# Altium footprint library FootPrintLib_11.PcbLib: 376 footprints (part 21 of 24)
Each footprint in its own frame and in the unit in brackets; x right, y up, seen from the top. Pads: shape width x height; smd on the part's side, far side on the other; paste and mask are expansions set on the pad; w line width, h text height; cw(c..) or ccw(c..) is an arc to the next point about the centre after c.
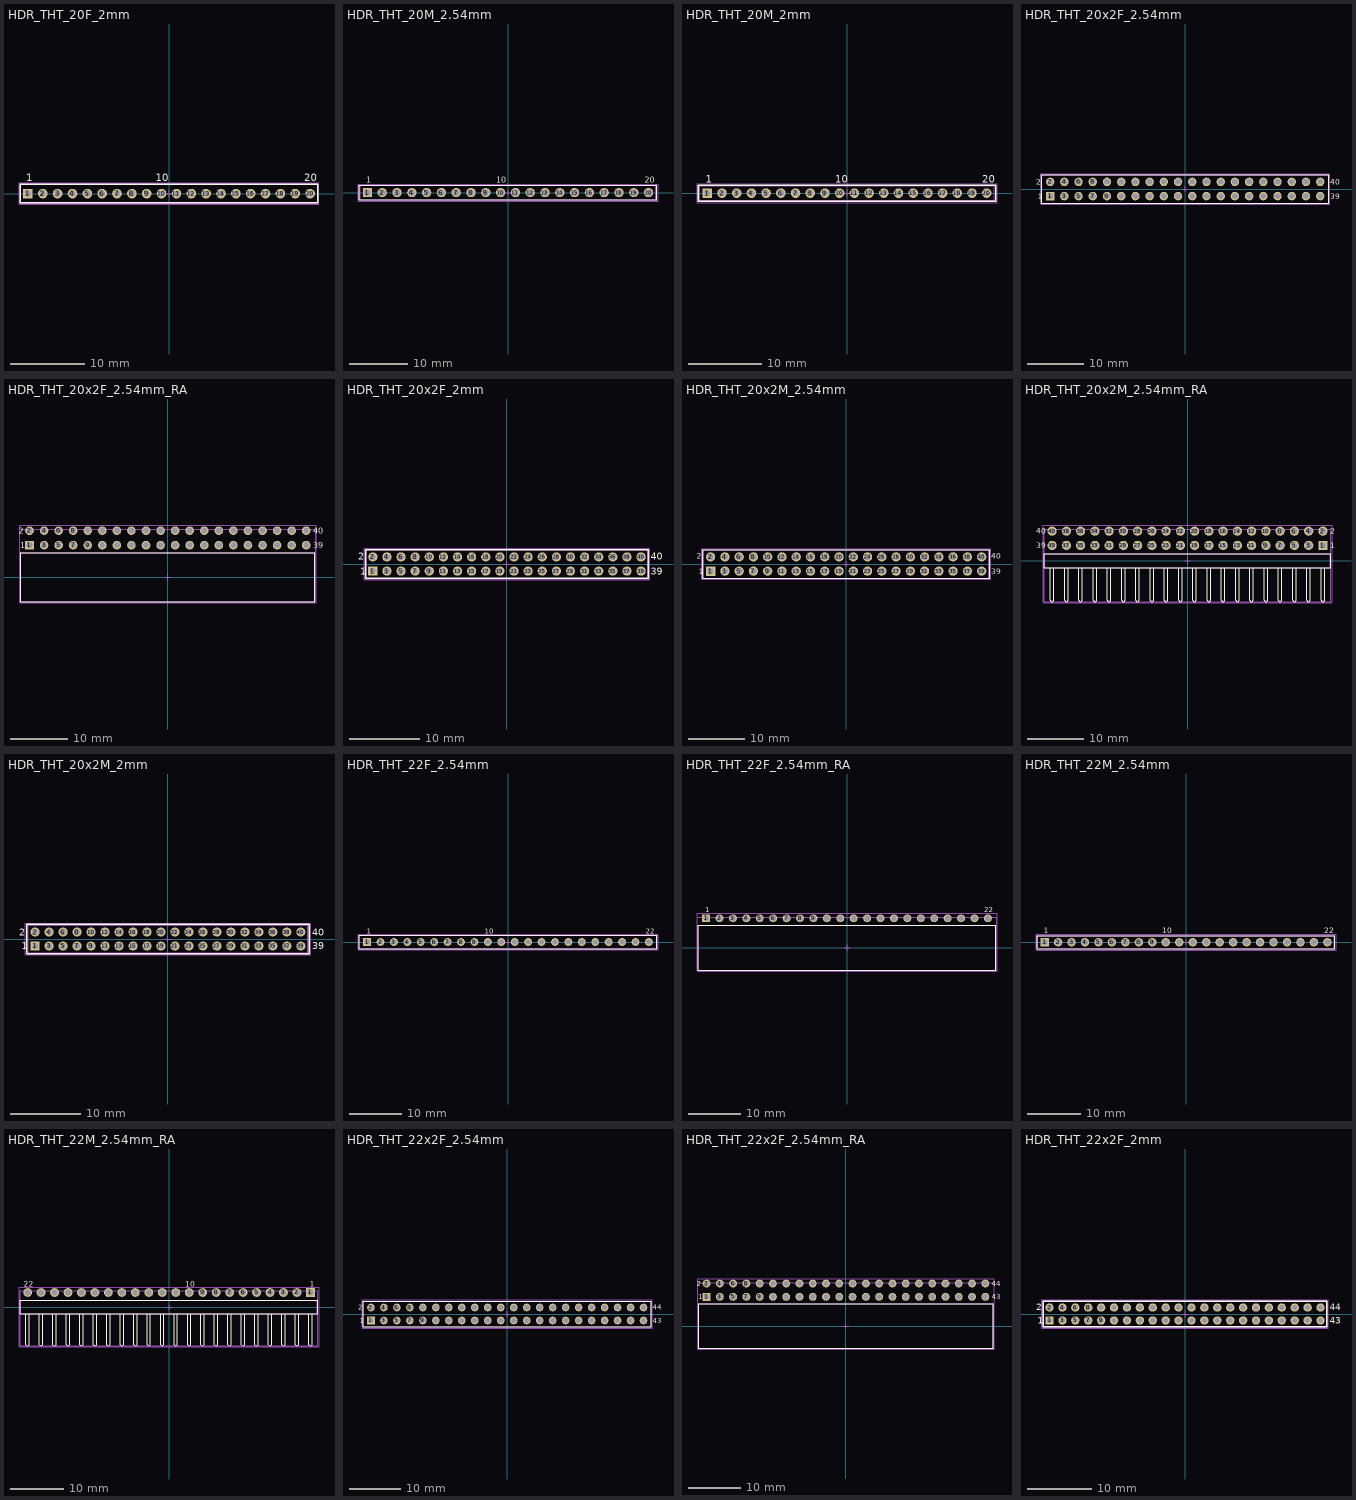
[diagram p20: the footprints below, top view; thin cyan lines are the x and y axes]

## HDR_THT_20F_2mm [mm] "Socket Header, Pitch 2.00 mm, THT, Vertical, single row, 20p"
height 4.45
pads (20):
  rect 1.3x1.3 hole 0.8: 1(-19,0)
  round 1.3 hole 0.8: 2(-17,0) 3(-15,0) 4(-13,0) 5(-11,0) 6(-9,0) 7(-7,0) 8(-5,0) 9(-3,0) 10(-1,0) 11(1,0) 12(3,0) 13(5,0) 14(7,0) 15(9,0) 16(11,0) 17(13,0) 18(15,0) 19(17,0) 20(19,0)
Top Overlay:
  lines w0.2: -20,-1.25 20,-1.25 20,1.25 -20,1.25 -20,-1.25
  text "20" at 18.2,1.7 h1
  text "1" at -19.2,1.7 h1
  text "10" at -1.8,1.7 h1
Mechanical 11:
  lines w0.1: -20,-1.25 20,-1.25 20,1.25 -20,1.25 -20,-1.25
Mechanical 13:
  lines w0.1: -20.15,-1.325 20.15,-1.325 20.15,1.325 -20.15,1.325 -20.15,-1.325
Mechanical 15:
  lines w0.1: -0.5,0 0.5,0 ; 0,-0.5 0,0.5 ; -20.2,-1.45 20.2,-1.45 20.2,1.45 -20.2,1.45 -20.2,-1.45
3D body "62002011821.stp": height 4.35, standoff -2.65, extent -20.25,-1.25 20.25,1.25

## HDR_THT_20M_2.54mm [mm] "Pin Header, pitch 2.54 mm, THT, Vertical, single row, 20p"
height 8.54
pads (20):
  rect 1.6x1.6 hole 1.1: 1(-24.13,0)
  round 1.6 hole 1.1: 2(-21.59,0) 3(-19.05,0) 4(-16.51,0) 5(-13.97,0) 6(-11.43,0) 7(-8.89,0) 8(-6.35,0) 9(-3.81,0) 10(-1.27,0) 11(1.27,0) 12(3.81,0) 13(6.35,0) 14(8.89,0) 15(11.43,0) 16(13.97,0) 17(16.51,0) 18(19.05,0) 19(21.59,0) 20(24.13,0)
Top Overlay:
  lines w0.2: -25.55,-1.27 25.55,-1.27 25.55,1.27 -25.55,1.27 -25.55,-1.27
  text "10" at -1.98,1.7 h1
  text "1" at -24.32,1.7 h1
  text "20" at 23.5,1.7 h1
Mechanical 11:
  lines w0.1: -25.4,-1.27 -25.4,1.27 25.4,1.27 25.4,-1.27 -25.4,-1.27
Mechanical 13:
  lines w0.1: -25.55,-1.27 25.55,-1.27 25.55,1.27 -25.55,1.27 -25.55,-1.27
Mechanical 15:
  lines w0.1: -0.5,0 0.5,0 ; 0,-0.5 0,0.5 ; -25.75,-1.47 25.75,-1.47 25.75,1.47 -25.75,1.47 -25.75,-1.47
3D body "61302011121.stp": height 8.57, standoff -2.97, extent -25.4,-1.27 25.4,1.27

## HDR_THT_20M_2mm [mm] "Pin Header, pitch 2.00 mm, THT, Vertical, single row, 20p"
height 6.35
pads (20):
  rect 1.3x1.3 hole 0.8: 1(-19,0)
  round 1.3 hole 0.8: 2(-17,0) 3(-15,0) 4(-13,0) 5(-11,0) 6(-9,0) 7(-7,0) 8(-5,0) 9(-3,0) 10(-1,0) 11(1,0) 12(3,0) 13(5,0) 14(7,0) 15(9,0) 16(11,0) 17(13,0) 18(15,0) 19(17,0) 20(19,0)
Top Overlay:
  lines w0.2: -20.2,-1.075 20.2,-1.075 20.2,1.075 -20.2,1.075 -20.2,-1.075
  text "10" at -1.6,1.4 h1
  text "1" at -19.2,1.4 h1
  text "20" at 18.4,1.4 h1
Mechanical 11:
  lines w0.1: -20,-1 -20,1 20,1 20,-1 -20,-1
Mechanical 13:
  lines w0.1: -20.2,-1.075 20.2,-1.075 20.2,1.075 -20.2,1.075 -20.2,-1.075
Mechanical 15:
  lines w0.1: -0.5,0 0.5,0 ; 0,-0.5 0,0.5 ; -20.4,-1.275 20.4,-1.275 20.4,1.275 -20.4,1.275 -20.4,-1.275
3D body "62002011121.stp": height 6.05, standoff -2.65, extent -20,-1 20,1

## HDR_THT_20x2F_2.54mm [mm] "Socket Header, Pitch 2.54 mm, THT, Vertical, dual row, 40p"
height 8.4
pads (40):
  rect 1.5x1.5 hole 1.02: 1(-24.13,-1.27)
  round 1.5 hole 1.02: 2(-24.13,1.27) 3(-21.59,-1.27) 4(-21.59,1.27) 5(-19.05,-1.27) 6(-19.05,1.27) 7(-16.51,-1.27) 8(-16.51,1.27) 9(-13.97,-1.27) 10(-13.97,1.27) 11(-11.43,-1.27) 12(-11.43,1.27) 13(-8.89,-1.27) 14(-8.89,1.27) 15(-6.35,-1.27) 16(-6.35,1.27) 17(-3.81,-1.27) 18(-3.81,1.27) 19(-1.27,-1.27) 20(-1.27,1.27) 21(1.27,-1.27) 22(1.27,1.27) 23(3.81,-1.27) 24(3.81,1.27) 25(6.35,-1.27) 26(6.35,1.27) 27(8.89,-1.27) 28(8.89,1.27) 29(11.43,-1.27) 30(11.43,1.27) 31(13.97,-1.27) 32(13.97,1.27) 33(16.51,-1.27) 34(16.51,1.27) 35(19.05,-1.27) 36(19.05,1.27) 37(21.59,-1.27) 38(21.59,1.27) 39(24.13,-1.27) 40(24.13,1.27)
Top Overlay:
  lines w0.2: -25.65,-2.54 25.65,-2.54 25.65,2.54 -25.65,2.54 -25.65,-2.54
  text "40" at 25.96,0.8 h1
  text "39" at 25.96,-1.8 h1
  text "1" at -26.36,-1.8 h1
  text "2" at -26.66,0.8 h1
Mechanical 11:
  lines w0.1: -25.65,-2.54 -25.65,2.54 25.65,2.54 25.65,-2.54 -25.65,-2.54
Mechanical 13:
  lines w0.1: -25.775,-2.54 25.775,-2.54 25.775,2.54 -25.775,2.54 -25.775,-2.54
Mechanical 15:
  lines w0.1: -0.5,0 0.5,0 ; 0,-0.5 0,0.5 ; -25.85,-2.74 25.85,-2.74 25.85,2.74 -25.85,2.74 -25.85,-2.74
3D body "61304021821.stp": height 8.45, standoff -3.05, extent -25.65,-2.54 25.65,2.54

## HDR_THT_20x2F_2.54mm_RA [mm] "Socket Header, Pitch 2.54 mm, THT, Angled, dual row, 40p"
height 5.08
pads (40):
  rect 1.5x1.5 hole 1.02: 1(-24.13,5.61)
  round 1.5 hole 1.02: 2(-24.13,8.15) 3(-21.59,5.61) 4(-21.59,8.15) 5(-19.05,5.61) 6(-19.05,8.15) 7(-16.51,5.61) 8(-16.51,8.15) 9(-13.97,5.61) 10(-13.97,8.15) 11(-11.43,5.61) 12(-11.43,8.15) 13(-8.89,5.61) 14(-8.89,8.15) 15(-6.35,5.61) 16(-6.35,8.15) 17(-3.81,5.61) 18(-3.81,8.15) 19(-1.27,5.61) 20(-1.27,8.15) 21(1.27,5.61) 22(1.27,8.15) 23(3.81,5.61) 24(3.81,8.15) 25(6.35,5.61) 26(6.35,8.15) 27(8.89,5.61) 28(8.89,8.15) 29(11.43,5.61) 30(11.43,8.15) 31(13.97,5.61) 32(13.97,8.15) 33(16.51,5.61) 34(16.51,8.15) 35(19.05,5.61) 36(19.05,8.15) 37(21.59,5.61) 38(21.59,8.15) 39(24.13,5.61) 40(24.13,8.15)
Top Overlay:
  lines w0.2: -25.65,-4.25 -25.65,4.25 25.65,4.25 25.65,-4.25 -25.65,-4.25
  text "2" at -25.96,7.6 h1
  text "1" at -25.76,5.1 h1
  text "39" at 25.36,5.1 h1
  text "40" at 25.36,7.6 h1
Mechanical 11:
  lines w0.1: -25.65,-4.25 25.65,-4.25 25.65,4.25 -25.65,4.25 -25.65,-4.25
Mechanical 13:
  lines w0.1: -25.8,-4.25 25.8,-4.25 25.8,8.35 -25.8,8.35 -25.8,-4.25
Mechanical 15:
  lines w0.1: -0.5,0 0.5,0 ; 0,-0.5 0,0.5 ; -25.85,-4.45 25.85,-4.45 25.85,9.1 -25.85,9.1 -25.85,-4.45
3D body "613040243121.stp": height 5.05, standoff -3.25, extent -25.65,-4.25 25.65,8.35

## HDR_THT_20x2F_2mm [mm] "Socket Header, Pitch 2.00 mm, THT, Vertical, dual row, 40p"
height 4.45
pads (40):
  rect 1.3x1.3 hole 0.8: 1(-19,-1)
  round 1.3 hole 0.8: 2(-19,1) 3(-17,-1) 4(-17,1) 5(-15,-1) 6(-15,1) 7(-13,-1) 8(-13,1) 9(-11,-1) 10(-11,1) 11(-9,-1) 12(-9,1) 13(-7,-1) 14(-7,1) 15(-5,-1) 16(-5,1) 17(-3,-1) 18(-3,1) 19(-1,-1) 20(-1,1) 21(1,-1) 22(1,1) 23(3,-1) 24(3,1) 25(5,-1) 26(5,1) 27(7,-1) 28(7,1) 29(9,-1) 30(9,1) 31(11,-1) 32(11,1) 33(13,-1) 34(13,1) 35(15,-1) 36(15,1) 37(17,-1) 38(17,1) 39(19,-1) 40(19,1)
Top Overlay:
  lines w0.2: -20,-2 -20,2 20,2 20,-2 -20,-2
  text "1" at -20.8,-1.5 h1
  text "2" at -21.1,0.6 h1
  text "40" at 20.4,0.6 h1
  text "39" at 20.4,-1.5 h1
Mechanical 11:
  lines w0.1: -20,-2 -20,2 20,2 20,-2 -20,-2
Mechanical 13:
  lines w0.1: -20.15,-2.075 -20.15,2.075 20.15,2.075 20.15,-2.075 -20.15,-2.075
Mechanical 15:
  lines w0.1: -0.5,0 0.5,0 ; 0,-0.5 0,0.5 ; -20.2,-2.2 -20.2,2.2 20.2,2.2 20.2,-2.2 -20.2,-2.2
3D body "62004021821.stp": height 4.35, standoff -2.35, extent -20.25,-2 20.25,2

## HDR_THT_20x2M_2.54mm [mm] "Pin Header, pitch 2.54 mm, THT, Vertical, dual row, 40p"
height 8.54
pads (40):
  rect 1.65x1.65 hole 1.1: 1(-24.13,-1.27)
  round 1.65 hole 1.1: 2(-24.13,1.27) 3(-21.59,-1.27) 4(-21.59,1.27) 5(-19.05,-1.27) 6(-19.05,1.27) 7(-16.51,-1.27) 8(-16.51,1.27) 9(-13.97,-1.27) 10(-13.97,1.27) 11(-11.43,-1.27) 12(-11.43,1.27) 13(-8.89,-1.27) 14(-8.89,1.27) 15(-6.35,-1.27) 16(-6.35,1.27) 17(-3.81,-1.27) 18(-3.81,1.27) 19(-1.27,-1.27) 20(-1.27,1.27) 21(1.27,-1.27) 22(1.27,1.27) 23(3.81,-1.27) 24(3.81,1.27) 25(6.35,-1.27) 26(6.35,1.27) 27(8.89,-1.27) 28(8.89,1.27) 29(11.43,-1.27) 30(11.43,1.27) 31(13.97,-1.27) 32(13.97,1.27) 33(16.51,-1.27) 34(16.51,1.27) 35(19.05,-1.27) 36(19.05,1.27) 37(21.59,-1.27) 38(21.59,1.27) 39(24.13,-1.27) 40(24.13,1.27)
Top Overlay:
  lines w0.2: -25.55,-2.54 -25.55,2.54 25.55,2.54 25.55,-2.54 -25.55,-2.54
  text "2" at -26.56,0.9 h1
  text "1" at -26.26,-1.8 h1
  text "39" at 25.86,-1.8 h1
  text "40" at 25.86,0.9 h1
Mechanical 11:
  lines w0.1: -25.4,-2.54 -25.4,2.54 25.4,2.54 25.4,-2.54 -25.4,-2.54
Mechanical 13:
  lines w0.1: -25.55,-2.54 -25.55,2.54 25.55,2.54 25.55,-2.54 -25.55,-2.54
Mechanical 15:
  lines w0.1: -0.5,0 0.5,0 ; 0,-0.5 0,0.5 ; -25.75,-2.74 -25.75,2.74 25.75,2.74 25.75,-2.74 -25.75,-2.74
3D body "61304021121.stp": height 8.59, standoff -2.95, extent -25.4,-2.54 25.4,2.54

## HDR_THT_20x2M_2.54mm_RA [mm] "Pin Header, pitch 2.54 mm, THT, Angled, dual row, 40p"
height 5.08
pads (40):
  rect 1.65x1.65 hole 1.1: 1(24.13,2.73)
  round 1.65 hole 1.1: 2(24.13,5.27) 3(21.59,2.73) 4(21.59,5.27) 5(19.05,2.73) 6(19.05,5.27) 7(16.51,2.73) 8(16.51,5.27) 9(13.97,2.73) 10(13.97,5.27) 11(11.43,2.73) 12(11.43,5.27) 13(8.89,2.73) 14(8.89,5.27) 15(6.35,2.73) 16(6.35,5.27) 17(3.81,2.73) 18(3.81,5.27) 19(1.27,2.73) 20(1.27,5.27) 21(-1.27,2.73) 22(-1.27,5.27) 23(-3.81,2.73) 24(-3.81,5.27) 25(-6.35,2.73) 26(-6.35,5.27) 27(-8.89,2.73) 28(-8.89,5.27) 29(-11.43,2.73) 30(-11.43,5.27) 31(-13.97,2.73) 32(-13.97,5.27) 33(-16.51,2.73) 34(-16.51,5.27) 35(-19.05,2.73) 36(-19.05,5.27) 37(-21.59,2.73) 38(-21.59,5.27) 39(-24.13,2.73) 40(-24.13,5.27)
Top Overlay:
  lines w0.15: -24.45,-1.335 -24.45,-7.07 -24.25,-7.27 -24.01,-7.27 -23.81,-7.07 -23.81,-1.31 ; -21.91,-1.335 -21.91,-7.07 -21.71,-7.27 -21.47,-7.27 -21.27,-7.07 -21.27,-1.31 ; -19.37,-1.335 -19.37,-7.07 -19.17,-7.27 -18.93,-7.27 -18.73,-7.07 -18.73,-1.31 ; -16.83,-1.335 -16.83,-7.07 -16.63,-7.27 -16.39,-7.27 -16.19,-7.07 -16.19,-1.31 ; -14.29,-1.335 -14.29,-7.07 -14.09,-7.27 -13.85,-7.27 -13.65,-7.07 -13.65,-1.31 ; -11.75,-1.335 -11.75,-7.07 -11.55,-7.27 -11.31,-7.27 -11.11,-7.07 -11.11,-1.31 ; -9.21,-1.335 -9.21,-7.07 -9.01,-7.27 -8.77,-7.27 -8.57,-7.07 -8.57,-1.31 ; -6.67,-1.335 -6.67,-7.07 -6.47,-7.27 -6.23,-7.27 -6.03,-7.07 -6.03,-1.31 ; -4.13,-1.335 -4.13,-7.07 -3.93,-7.27 -3.69,-7.27 -3.49,-7.07 -3.49,-1.31 ; -1.59,-1.335 -1.59,-7.07 -1.39,-7.27 -1.15,-7.27 -0.95,-7.07 -0.95,-1.31 ; 0.95,-1.335 0.95,-7.07 1.15,-7.27 1.39,-7.27 1.59,-7.07 1.59,-1.31 ; 3.49,-1.335 3.49,-7.07 3.69,-7.27 3.93,-7.27 4.13,-7.07 4.13,-1.31 ; 6.03,-1.335 6.03,-7.07 6.23,-7.27 6.47,-7.27 6.67,-7.07 6.67,-1.31 ; 8.57,-1.335 8.57,-7.07 8.77,-7.27 9.01,-7.27 9.21,-7.07 9.21,-1.31 ; 11.11,-1.335 11.11,-7.07 11.31,-7.27 11.55,-7.27 11.75,-7.07 11.75,-1.31 ; 13.65,-1.335 13.65,-7.07 13.85,-7.27 14.09,-7.27 14.29,-7.07 14.29,-1.31 ; 16.19,-1.335 16.19,-7.07 16.39,-7.27 16.63,-7.27 16.83,-7.07 16.83,-1.31 ; 18.73,-1.335 18.73,-7.07 18.93,-7.27 19.17,-7.27 19.37,-7.07 19.37,-1.31 ; 21.27,-1.335 21.27,-7.07 21.47,-7.27 21.71,-7.27 21.91,-7.07 21.91,-1.31 ; 23.81,-1.335 23.81,-7.07 24.01,-7.27 24.25,-7.27 24.45,-7.07 24.45,-1.31
  lines w0.2: -25.55,-1.27 25.55,-1.27 25.55,1.27 -25.55,1.27 -25.55,-1.27
  text "40" at -27,4.8 h1
  text "39" at -27,2.2 h1
  text "2" at 25.46,4.8 h1
  text "1" at 25.46,2.2 h1
Mechanical 11:
  lines w0.1: -25.4,-1.27 25.4,-1.27 25.4,1.27 -25.4,1.27 -25.4,-1.27
Mechanical 13:
  lines w0.1: -25.55,-7.27 -25.55,5.63 25.55,5.63 25.55,-7.27 -25.55,-7.27
Mechanical 15:
  lines w0.1: -0.5,0 0.5,0 ; 0,-0.5 0,0.5 ; -25.75,-7.47 -25.75,6.295 25.75,6.295 25.75,-7.47 -25.75,-7.47
3D body "61304021021.stp": height 5.14, standoff -2.94, extent -25.4,-7.27 25.4,5.63

## HDR_THT_20x2M_2mm [mm] "2.00 mm THT Dual Pin Header, 40p"
height 6
pads (40):
  rect 1.3x1.3 hole 0.8: 1(-19,-1)
  round 1.3 hole 0.8: 2(-19,1) 3(-17,-1) 4(-17,1) 5(-15,-1) 6(-15,1) 7(-13,-1) 8(-13,1) 9(-11,-1) 10(-11,1) 11(-9,-1) 12(-9,1) 13(-7,-1) 14(-7,1) 15(-5,-1) 16(-5,1) 17(-3,-1) 18(-3,1) 19(-1,-1) 20(-1,1) 21(1,-1) 22(1,1) 23(3,-1) 24(3,1) 25(5,-1) 26(5,1) 27(7,-1) 28(7,1) 29(9,-1) 30(9,1) 31(11,-1) 32(11,1) 33(13,-1) 34(13,1) 35(15,-1) 36(15,1) 37(17,-1) 38(17,1) 39(19,-1) 40(19,1)
Top Overlay:
  lines w0.2: -20.2,-2.075 20.2,-2.075 20.2,2.075 -20.2,2.075 -20.2,-2.075
  text "40" at 20.6,0.5 h1
  text "39" at 20.6,-1.5 h1
  text "2" at -21.3,0.5 h1
  text "1" at -20.9,-1.5 h1
Mechanical 11:
  lines w0.1: -20,-2 20,-2 20,2 -20,2 -20,-2
Mechanical 13:
  lines w0.1: -20.2,-2.075 20.2,-2.075 20.2,2.075 -20.2,2.075 -20.2,-2.075
Mechanical 15:
  lines w0.1: -0.5,0 0.5,0 ; 0,-0.5 0,0.5 ; -20.4,-2.275 20.4,-2.275 20.4,2.275 -20.4,2.275 -20.4,-2.275
3D body "62004021121.stp": height 6.05, standoff -2.65, extent -20,-2 20,2

## HDR_THT_22F_2.54mm [mm] "Socket Header, Pitch 2.54 mm, THT, Vertical, single row, 22p"
height 8.5
pads (22):
  rect 1.5x1.5 hole 1.02: 1(-26.67,0)
  round 1.5 hole 1.02: 2(-24.13,0) 3(-21.59,0) 4(-19.05,0) 5(-16.51,0) 6(-13.97,0) 7(-11.43,0) 8(-8.89,0) 9(-6.35,0) 10(-3.81,0) 11(-1.27,0) 12(1.27,0) 13(3.81,0) 14(6.35,0) 15(8.89,0) 16(11.43,0) 17(13.97,0) 18(16.51,0) 19(19.05,0) 20(21.59,0) 21(24.13,0) 22(26.67,0)
Top Overlay:
  lines w0.2: -28.19,-1.25 -28.19,1.25 28.19,1.25 28.19,-1.25 -28.19,-1.25
  text "1" at -26.76,1.6 h1
  text "10" at -4.44,1.6 h1
  text "22" at 26.04,1.6 h1
Mechanical 11:
  lines w0.1: -28.19,-1.25 -28.19,1.25 28.19,1.25 28.19,-1.25 -28.19,-1.25
Mechanical 13:
  lines w0.1: -28.315,-1.25 28.315,-1.25 28.315,1.25 -28.315,1.25 -28.315,-1.25
Mechanical 15:
  lines w0.1: -0.5,0 0.5,0 ; 0,-0.5 0,0.5 ; -28.39,-1.45 28.39,-1.45 28.39,1.45 -28.39,1.45 -28.39,-1.45
3D body "61302211821.stp": height 8.55, standoff -3.06, extent -28.19,-1.25 28.19,1.25

## HDR_THT_22F_2.54mm_RA [mm] "Socket Header, Pitch 2.54 mm, THT, Angled, single row, 22p"
height 2.5
pads (22):
  rect 1.5x1.5 hole 1.02: 1(-26.67,5.55)
  round 1.5 hole 1.02: 2(-24.13,5.55) 3(-21.59,5.55) 4(-19.05,5.55) 5(-16.51,5.55) 6(-13.97,5.55) 7(-11.43,5.55) 8(-8.89,5.55) 9(-6.35,5.55) 10(-3.81,5.55) 11(-1.27,5.55) 12(1.27,5.55) 13(3.81,5.55) 14(6.35,5.55) 15(8.89,5.55) 16(11.43,5.55) 17(13.97,5.55) 18(16.51,5.55) 19(19.05,5.55) 20(21.59,5.55) 21(24.13,5.55) 22(26.67,5.55)
Top Overlay:
  lines w0.2: -28.19,-4.25 28.19,-4.25 28.19,4.25 -28.19,4.25 -28.19,-4.25
  text "1" at -26.83,6.7 h1
  text "22" at 25.93,6.7 h1
Mechanical 11:
  lines w0.1: -28.19,-4.25 -28.19,4.25 28.19,4.25 28.19,-4.25 -28.19,-4.25
Mechanical 13:
  lines w0.1: -28.315,-4.25 28.315,-4.25 28.315,5.75 -28.315,5.75 -28.315,-4.25
Mechanical 15:
  lines w0.1: -0.5,0 0.5,0 ; 0,-0.5 0,0.5 ; -28.39,-4.45 28.39,-4.45 28.39,6.5 -28.39,6.5 -28.39,-4.45
3D body "613022143121.stp": height 2.55, standoff -3.04, extent -28.19,-4.25 28.19,5.75

## HDR_THT_22M_2.54mm [mm] "Pin Header, pitch 2.54 mm, THT, Vertical, single row, 22p"
height 8.54
pads (22):
  rect 1.6x1.6 hole 1.1: 1(-26.67,0)
  round 1.6 hole 1.1: 2(-24.13,0) 3(-21.59,0) 4(-19.05,0) 5(-16.51,0) 6(-13.97,0) 7(-11.43,0) 8(-8.89,0) 9(-6.35,0) 10(-3.81,0) 11(-1.27,0) 12(1.27,0) 13(3.81,0) 14(6.35,0) 15(8.89,0) 16(11.43,0) 17(13.97,0) 18(16.51,0) 19(19.05,0) 20(21.59,0) 21(24.13,0) 22(26.67,0)
Top Overlay:
  lines w0.2: -28.09,-1.27 -28.09,1.27 28.09,1.27 28.09,-1.27 -28.09,-1.27
  text "1" at -26.86,1.7 h1
  text "10" at -4.52,1.7 h1
  text "22" at 26.04,1.7 h1
Mechanical 11:
  lines w0.1: -27.94,-1.27 27.94,-1.27 27.94,1.27 -27.94,1.27 -27.94,-1.27
Mechanical 13:
  lines w0.1: -28.09,-1.27 -28.09,1.27 28.09,1.27 28.09,-1.27 -28.09,-1.27
Mechanical 15:
  lines w0.1: -0.5,0 0.5,0 ; 0,-0.5 0,0.5 ; -28.29,-1.47 -28.29,1.47 28.29,1.47 28.29,-1.47 -28.29,-1.47
3D body "61302211121.stp": height 8.57, standoff -2.97, extent -27.94,-1.27 27.94,1.27

## HDR_THT_22M_2.54mm_RA [mm] "Pin Header, pitch 2.54 mm, THT, Angled, single row, 22p"
height 2.54
pads (22):
  rect 1.65x1.65 hole 1.1: 1(26.67,2.77)
  round 1.65 hole 1.1: 2(24.13,2.77) 3(21.59,2.77) 4(19.05,2.77) 5(16.51,2.77) 6(13.97,2.77) 7(11.43,2.77) 8(8.89,2.77) 9(6.35,2.77) 10(3.81,2.77) 11(1.27,2.77) 12(-1.27,2.77) 13(-3.81,2.77) 14(-6.35,2.77) 15(-8.89,2.77) 16(-11.43,2.77) 17(-13.97,2.77) 18(-16.51,2.77) 19(-19.05,2.77) 20(-21.59,2.77) 21(-24.13,2.77) 22(-26.67,2.77)
Top Overlay:
  lines w0.15: -26.99,-1.27 -26.99,-7.07 -26.67,-7.27 -26.35,-7.07 -26.35,-1.27 ; -24.45,-1.27 -24.45,-7.07 -24.13,-7.27 -23.81,-7.07 -23.81,-1.27 ; -21.91,-1.27 -21.91,-7.07 -21.59,-7.27 -21.27,-7.07 -21.27,-1.27 ; -19.37,-1.27 -19.37,-7.07 -19.05,-7.27 -18.73,-7.07 -18.73,-1.27 ; -16.83,-1.27 -16.83,-7.07 -16.51,-7.27 -16.19,-7.07 -16.19,-1.27 ; -14.29,-1.27 -14.29,-7.07 -13.97,-7.27 -13.65,-7.07 -13.65,-1.27 ; -11.75,-1.27 -11.75,-7.07 -11.43,-7.27 -11.11,-7.07 -11.11,-1.27 ; -9.21,-1.27 -9.21,-7.07 -8.89,-7.27 -8.57,-7.07 -8.57,-1.27 ; -6.67,-1.27 -6.67,-7.07 -6.35,-7.27 -6.03,-7.07 -6.03,-1.27 ; -4.13,-1.27 -4.13,-7.07 -3.81,-7.27 -3.49,-7.07 -3.49,-1.27 ; -1.59,-1.27 -1.59,-7.07 -1.27,-7.27 -0.95,-7.07 -0.95,-1.27 ; 0.95,-1.27 0.95,-7.07 1.27,-7.27 1.59,-7.07 1.59,-1.27 ; 3.49,-1.27 3.49,-7.07 3.81,-7.27 4.13,-7.07 4.13,-1.27 ; 6.03,-1.27 6.03,-7.07 6.35,-7.27 6.67,-7.07 6.67,-1.27 ; 8.57,-1.27 8.57,-7.07 8.89,-7.27 9.21,-7.07 9.21,-1.27 ; 11.11,-1.27 11.11,-7.07 11.43,-7.27 11.75,-7.07 11.75,-1.27 ; 13.65,-1.27 13.65,-7.07 13.97,-7.27 14.29,-7.07 14.29,-1.27 ; 16.19,-1.27 16.19,-7.07 16.51,-7.27 16.83,-7.07 16.83,-1.27 ; 18.73,-1.27 18.73,-7.07 19.05,-7.27 19.37,-7.07 19.37,-1.27 ; 21.27,-1.27 21.27,-7.07 21.59,-7.27 21.91,-7.07 21.91,-1.27 ; 23.81,-1.27 23.81,-7.07 24.13,-7.27 24.45,-7.07 24.45,-1.27 ; 26.35,-1.27 26.35,-7.07 26.67,-7.27 26.99,-7.07 26.99,-1.27
  lines w0.2: -28.09,-1.27 -28.09,1.27 28.09,1.27 28.09,-1.27 -28.09,-1.27
  text "1" at 26.5,3.9 h1
  text "22" at -27.44,3.9 h1
  text "10" at 3.04,3.9 h1
Mechanical 11:
  lines w0.1: -27.94,-1.27 -27.94,1.27 27.94,1.27 27.94,-1.27 -27.94,-1.27
Mechanical 13:
  lines w0.1: -28.09,-7.27 28.09,-7.27 28.09,3.09 -28.09,3.09 -28.09,-7.27
Mechanical 15:
  lines w0.1: -0.5,0 0.5,0 ; 0,-0.5 0,0.5 ; -28.29,-7.47 28.29,-7.47 28.29,3.795 -28.29,3.795 -28.29,-7.47
3D body "61302211021.stp": height 2.62, standoff -2.92, extent -27.94,-7.27 27.94,3.09

## HDR_THT_22x2F_2.54mm [mm] "Socket Header, Pitch 2.54 mm, THT, Vertical, dual row, 44p"
height 8.4
pads (44):
  rect 1.5x1.5 hole 1.02: 1(-26.67,-1.27)
  round 1.5 hole 1.02: 2(-26.67,1.27) 3(-24.13,-1.27) 4(-24.13,1.27) 5(-21.59,-1.27) 6(-21.59,1.27) 7(-19.05,-1.27) 8(-19.05,1.27) 9(-16.51,-1.27) 10(-16.51,1.27) 11(-13.97,-1.27) 12(-13.97,1.27) 13(-11.43,-1.27) 14(-11.43,1.27) 15(-8.89,-1.27) 16(-8.89,1.27) 17(-6.35,-1.27) 18(-6.35,1.27) 19(-3.81,-1.27) 20(-3.81,1.27) 21(-1.27,-1.27) 22(-1.27,1.27) 23(1.27,-1.27) 24(1.27,1.27) 25(3.81,-1.27) 26(3.81,1.27) 27(6.35,-1.27) 28(6.35,1.27) 29(8.89,-1.27) 30(8.89,1.27) 31(11.43,-1.27) 32(11.43,1.27) 33(13.97,-1.27) 34(13.97,1.27) 35(16.51,-1.27) 36(16.51,1.27) 37(19.05,-1.27) 38(19.05,1.27) 39(21.59,-1.27) 40(21.59,1.27) 41(24.13,-1.27) 42(24.13,1.27) 43(26.67,-1.27) 44(26.67,1.27)
Top Overlay:
  lines w0.2: -28.19,-2.54 28.19,-2.54 28.19,2.54 -28.19,2.54 -28.19,-2.54
  text "44" at 28.5,0.8 h1
  text "43" at 28.5,-1.8 h1
  text "1" at -28.9,-1.8 h1
  text "2" at -29.2,0.8 h1
Mechanical 11:
  lines w0.1: -28.19,-2.54 -28.19,2.54 28.19,2.54 28.19,-2.54 -28.19,-2.54
Mechanical 13:
  lines w0.1: -28.315,-2.54 28.315,-2.54 28.315,2.54 -28.315,2.54 -28.315,-2.54
Mechanical 15:
  lines w0.1: -0.5,0 0.5,0 ; 0,-0.5 0,0.5 ; -28.39,-2.74 28.39,-2.74 28.39,2.74 -28.39,2.74 -28.39,-2.74
3D body "61304421821.stp": height 8.45, standoff -3.05, extent -28.19,-2.54 28.19,2.54

## HDR_THT_22x2F_2.54mm_RA [mm] "Socket Header, Pitch 2.54 mm, THT, Angled, dual row, 44p"
height 5.08
pads (44):
  rect 1.5x1.5 hole 1.02: 1(-26.67,5.61)
  round 1.5 hole 1.02: 2(-26.67,8.15) 3(-24.13,5.61) 4(-24.13,8.15) 5(-21.59,5.61) 6(-21.59,8.15) 7(-19.05,5.61) 8(-19.05,8.15) 9(-16.51,5.61) 10(-16.51,8.15) 11(-13.97,5.61) 12(-13.97,8.15) 13(-11.43,5.61) 14(-11.43,8.15) 15(-8.89,5.61) 16(-8.89,8.15) 17(-6.35,5.61) 18(-6.35,8.15) 19(-3.81,5.61) 20(-3.81,8.15) 21(-1.27,5.61) 22(-1.27,8.15) 23(1.27,5.61) 24(1.27,8.15) 25(3.81,5.61) 26(3.81,8.15) 27(6.35,5.61) 28(6.35,8.15) 29(8.89,5.61) 30(8.89,8.15) 31(11.43,5.61) 32(11.43,8.15) 33(13.97,5.61) 34(13.97,8.15) 35(16.51,5.61) 36(16.51,8.15) 37(19.05,5.61) 38(19.05,8.15) 39(21.59,5.61) 40(21.59,8.15) 41(24.13,5.61) 42(24.13,8.15) 43(26.67,5.61) 44(26.67,8.15)
Top Overlay:
  lines w0.2: -28.19,-4.25 -28.19,4.25 28.19,4.25 28.19,-4.25 -28.19,-4.25
  text "2" at -28.5,7.6 h1
  text "1" at -28.3,5.1 h1
  text "43" at 27.9,5.1 h1
  text "44" at 27.9,7.6 h1
Mechanical 11:
  lines w0.1: -28.19,-4.25 28.19,-4.25 28.19,4.25 -28.19,4.25 -28.19,-4.25
Mechanical 13:
  lines w0.1: -28.34,-4.25 28.34,-4.25 28.34,8.35 -28.34,8.35 -28.34,-4.25
Mechanical 15:
  lines w0.1: -0.5,0 0.5,0 ; 0,-0.5 0,0.5 ; -28.39,-4.45 28.39,-4.45 28.39,9.1 -28.39,9.1 -28.39,-4.45
3D body "613044243121.stp": height 5.05, standoff -3.25, extent -28.19,-4.25 28.19,8.35

## HDR_THT_22x2F_2mm [mm] "Socket Header, Pitch 2.00 mm, THT, Vertical, dual row, 44p"
height 4.45
pads (44):
  rect 1.3x1.3 hole 0.8: 1(-21,-1)
  round 1.3 hole 0.8: 2(-21,1) 3(-19,-1) 4(-19,1) 5(-17,-1) 6(-17,1) 7(-15,-1) 8(-15,1) 9(-13,-1) 10(-13,1) 11(-11,-1) 12(-11,1) 13(-9,-1) 14(-9,1) 15(-7,-1) 16(-7,1) 17(-5,-1) 18(-5,1) 19(-3,-1) 20(-3,1) 21(-1,-1) 22(-1,1) 23(1,-1) 24(1,1) 25(3,-1) 26(3,1) 27(5,-1) 28(5,1) 29(7,-1) 30(7,1) 31(9,-1) 32(9,1) 33(11,-1) 34(11,1) 35(13,-1) 36(13,1) 37(15,-1) 38(15,1) 39(17,-1) 40(17,1) 41(19,-1) 42(19,1) 43(21,-1) 44(21,1)
Top Overlay:
  lines w0.2: -22,-2 -22,2 22,2 22,-2 -22,-2
  text "1" at -22.8,-1.5 h1
  text "2" at -23.1,0.6 h1
  text "44" at 22.4,0.6 h1
  text "43" at 22.4,-1.5 h1
Mechanical 11:
  lines w0.1: -22,-2 -22,2 22,2 22,-2 -22,-2
Mechanical 13:
  lines w0.1: -22.15,-2.075 -22.15,2.075 22.15,2.075 22.15,-2.075 -22.15,-2.075
Mechanical 15:
  lines w0.1: -0.5,0 0.5,0 ; 0,-0.5 0,0.5 ; -22.2,-2.2 -22.2,2.2 22.2,2.2 22.2,-2.2 -22.2,-2.2
3D body "62004421821.stp": height 4.35, standoff -2.35, extent -22.25,-2 22.25,2